# Altium footprint library MyLib.PcbLib: 3 footprints
Each footprint in its own frame and in the unit in brackets; x right, y up, seen from the top. Pads: shape width x height; smd on the part's side, far side on the other; paste and mask are expansions set on the pad; w line width, h text height; cw(c..) or ccw(c..) is an arc to the next point about the centre after c.
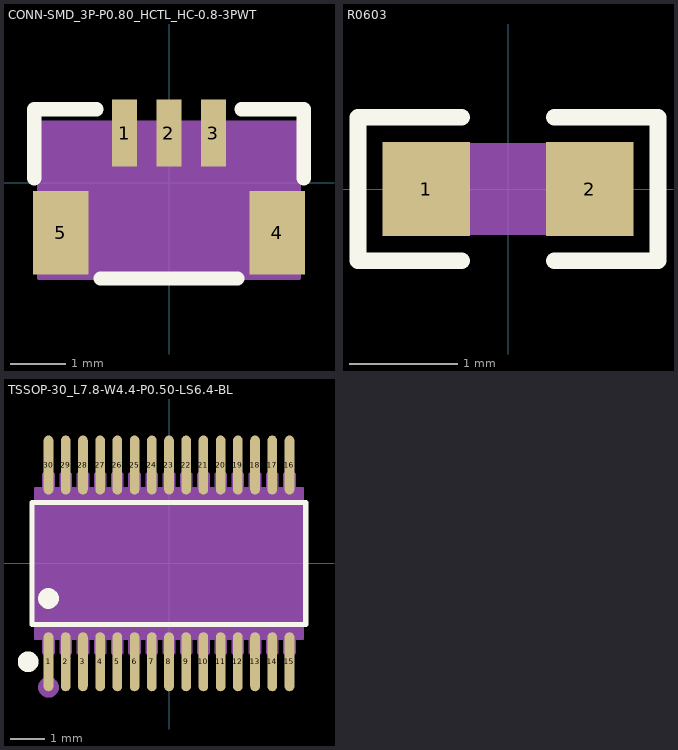
[diagram p0: the footprints below, top view; thin cyan lines are the x and y axes]

## CONN-SMD_3P-P0.80_HCTL_HC-0.8-3PWT [mm]
height 0.5
pads (5):
  rect 0.45x1.208 smd mask+0.051: 1(-0.8,0.898) 2(0,0.898) 3(0.8,0.898)
  rect 1x1.5 smd mask+0.051: 4(1.95,-0.898) 5(-1.95,-0.898)
Top Overlay:
  lines w0.254: -2.426,0.083 -2.426,1.326 -1.306,1.326 ; -1.231,-1.722 1.231,-1.722 ; 1.306,1.326 2.426,1.326 2.426,0.083
Mechanical 2:
  circle w0.2: c-0.806,1.278 r0.1
Mechanical 6:
  lines w0.051: -2.35,-1.722 -2.35,1.098 2.35,1.098 2.35,-1.722 -2.35,-1.722
Mechanical 8:
  region: -2.35,-1.722 -2.35,1.098 2.35,1.098 2.35,-1.722
Mechanical 9:
  region: -2.05,-0.453 -1.85,-0.453 -1.85,-1.343 -2.05,-1.343
  region: 1.85,-0.453 2.05,-0.453 2.05,-1.343 1.85,-1.343
  region: -0.075,1.098 0.075,1.098 0.075,0.468 -0.075,0.468
  region: -0.875,1.098 -0.725,1.098 -0.725,0.468 -0.875,0.468
  region: 0.725,1.098 0.875,1.098 0.875,0.468 0.725,0.468

## R0603 [mm] "10KΩ (1002) ±1%"
height 0.5
pads (2):
  rect 0.807x0.864 smd paste-100 mask+0.051: 1(-0.753,0) 2(0.753,0)
Top Overlay:
  lines w0.152: -0.426,-0.661 -1.385,-0.661 -1.385,0.661 -0.426,0.661 ; 0.426,-0.661 1.385,-0.661 1.385,0.661 0.426,0.661
Top Paste:
  region: -1.195,-0.45 -0.395,-0.45 -0.345,-0.4 -0.345,-0.172 -0.715,-0.172 -0.715,0.158 -0.345,0.158 -0.345,0.4 -0.395,0.45 -1.195,0.45 -1.245,0.4 -1.245,-0.4
  region: 1.195,0.45 0.395,0.45 0.345,0.4 0.345,0.172 0.715,0.172 0.715,-0.158 0.345,-0.158 0.345,-0.4 0.395,-0.45 1.195,-0.45 1.245,-0.4 1.245,0.4
Mechanical 6:
  lines w0.051: -0.8,-0.4 0.8,-0.4 0.8,0.4 -0.8,0.4 -0.8,-0.4
Mechanical 8:
  region: -0.8,-0.4 -0.8,0.4 0.8,0.4 0.8,-0.4
Mechanical 9:
  region: 0.8,-0.4 0.8,0.4 0.5,0.4 0.5,-0.4
  region: -0.8,-0.4 -0.8,0.4 -0.5,0.4 -0.5,-0.4

## TSSOP-30_L7.8-W4.4-P0.50-LS6.4-BL [mm] "芯片类型:监测芯片；保护芯片；均衡芯片;工作电压:6V~36V;电池类型:锂电池；磷酸铁锂电池;电池节数:6~10;工作温度:-40℃~+85℃;电池温度检测:支持;静态电流(Iq):40uA;接口类型:I2C;功能特性:过充保护；过流保护；电芯均衡；电池温度监测；过放保护；短路保护;"
height 0.5
pads (30):
  oval 0.28x1.715 smd mask+0.051: 1(-3.5,-2.857) 2(-3,-2.857) 3(-2.5,-2.857) 4(-2,-2.857) 5(-1.5,-2.857) 6(-1,-2.857) 7(-0.5,-2.857) 8(0,-2.857) 9(0.5,-2.857) 10(1,-2.857) 11(1.5,-2.857) 12(2,-2.857) 13(2.5,-2.857) 14(3,-2.857) 15(3.5,-2.857) 16(3.5,2.857) 17(3,2.857) 18(2.5,2.857) 19(2,2.857) 20(1.5,2.857) 21(1,2.857) 22(0.5,2.857) 23(0,2.857) 24(-0.5,2.857) 25(-1,2.857) 26(-1.5,2.857) 27(-2,2.857) 28(-2.5,2.857) 29(-3,2.857) 30(-3.5,2.857)
Top Overlay:
  circle w0.3: c-3.5,-1.019 r0.15
  circle w0.3: c-4.093,-2.857 r0.15
  lines w0.152: -3.976,-1.771 -3.976,1.771 3.976,1.771 3.976,-1.771 -3.976,-1.771
Mechanical 2:
  circle w0.3: c-3.5,-3.6 r0.15
Mechanical 6:
  lines w0.051: -3.9,-2.2 -3.9,2.2 3.9,2.2 3.9,-2.2 -3.9,-2.2
Mechanical 8:
  region: -3.9,-2.2 -3.9,2.2 3.9,2.2 3.9,-2.2
Mechanical 9:
  drawing of 150 lines, arcs and shapes, not listed